# Altium footprint library Footprint-Lib-PhilsLab.PcbLib: 544 footprints (part 1 of 34)
Each footprint in its own frame and in the unit in brackets; x right, y up, seen from the top. Pads: shape width x height; smd on the part's side, far side on the other; paste and mask are expansions set on the pad; w line width, h text height; cw(c..) or ccw(c..) is an arc to the next point about the centre after c.
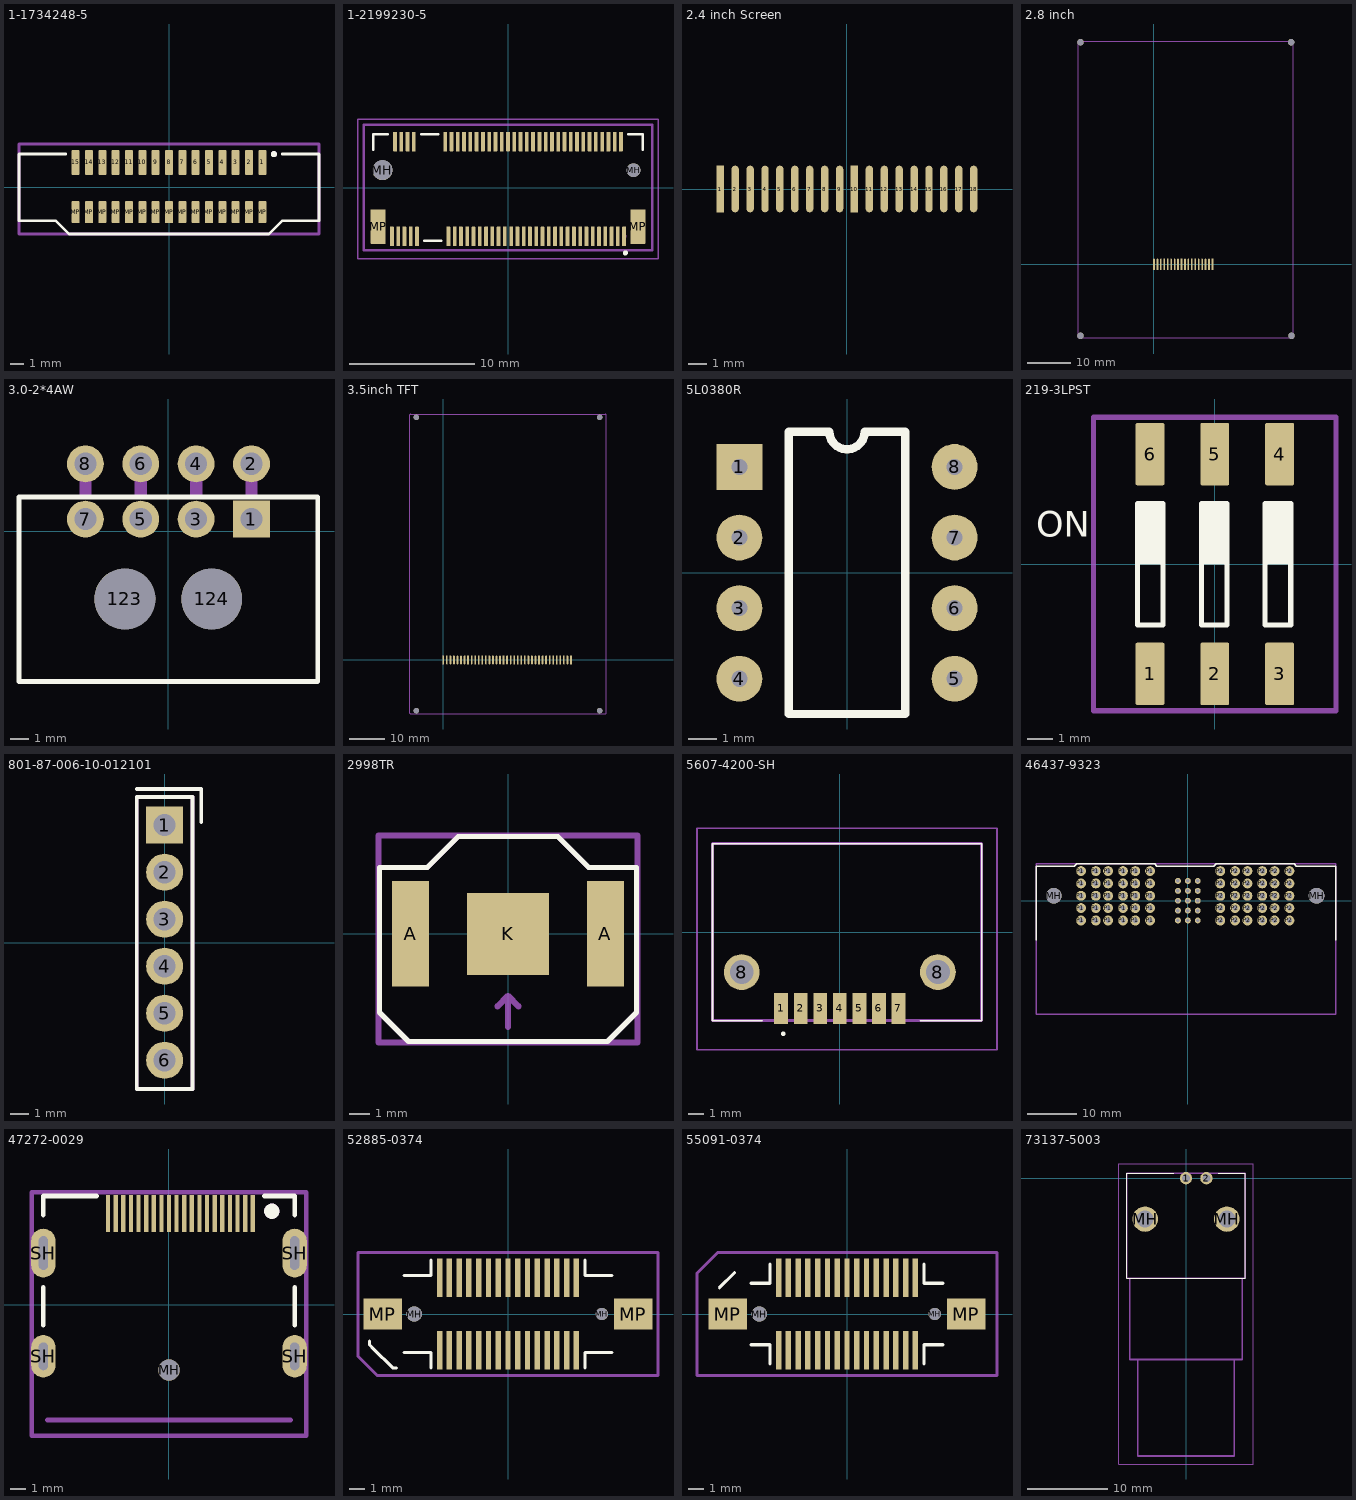
[diagram p0: the footprints below, top view; thin cyan lines are the x and y axes]

## 1-1734248-5 [mm]
pads (30):
  rrect25% 0.6x1.85 smd: 1(7,1.863) 2(6,1.863) 3(5,1.863) 4(4,1.863) 5(3,1.863) 6(2,1.863) 7(1,1.863) 8(0,1.863) 9(-1,1.863) 10(-2,1.863) 11(-3,1.863) 12(-4,1.863) 13(-5,1.863) 14(-6,1.863) 15(-7,1.863)
  rrect25% 0.6x1.65 smd: MP(-7,-1.862) MP(-6,-1.862) MP(-5,-1.862) MP(-4,-1.862) MP(-3,-1.862) MP(-2,-1.862) MP(-1,-1.862) MP(0,-1.862) MP(1,-1.862) MP(2,-1.862) MP(3,-1.862) MP(4,-1.862) MP(5,-1.862) MP(6,-1.862) MP(7,-1.862)
Top Overlay:
  circle w0.25: c7.866,2.49 r0.107
  lines w0.2: -7.75,2.5 -11.25,2.5 -11.25,-2.5 -8.5,-2.5 -7.5,-3.5 7.5,-3.5 8.5,-2.5 11.25,-2.5 11.25,2.5 8.5,2.5
Mechanical 13:
  circle w0.25: c7.871,2.497 r0.102
  lines w0.2: -11.25,-3.5 11.25,-3.5 11.25,3.25 -7.5,3.25 -11.25,3.25 -11.25,-3.5
  text "'.Designator'" at -5.84,-0.925 h1
3D body "1-1734248-5.stp": height 5.69, standoff 0.01, extent -11.2,-2.45 11.2,2.4

## 1-2199230-5 [mm]
pads (71):
  rrect25% 0.3x1.55 smd mask+0.12: 1(9.25,-3.887) 2(9,3.663) 3(8.75,-3.887) 4(8.5,3.663) 5(8.25,-3.887) 6(8,3.663) 7(7.75,-3.887) 8(7.5,3.663) 9(7.25,-3.887) 10(7,3.663) 11(6.75,-3.887) 12(6.5,3.663) 13(6.25,-3.887) 14(6,3.663) 15(5.75,-3.887) 16(5.5,3.663) 17(5.25,-3.887) 18(5,3.663) 19(4.75,-3.887) 20(4.5,3.663) 21(4.25,-3.887) 22(4,3.663) 23(3.75,-3.887) 24(3.5,3.663) 25(3.25,-3.887) 26(3,3.663) 27(2.75,-3.887) 28(2.5,3.663) 29(2.25,-3.887) 30(2,3.663) 31(1.75,-3.887) 32(1.5,3.663) 33(1.25,-3.887) 34(1,3.663) 35(0.75,-3.887) 36(0.5,3.663) 37(0.25,-3.887) 38(0,3.663) 39(-0.25,-3.887) 40(-0.5,3.663) 41(-0.75,-3.887) 42(-1,3.663) 43(-1.25,-3.887) 44(-1.5,3.663) 45(-1.75,-3.887) 46(-2,3.663) 47(-2.25,-3.887) 48(-2.5,3.663) 49(-2.75,-3.887) 50(-3,3.663) 51(-3.25,-3.887) 52(-3.5,3.663) 53(-3.75,-3.887) 54(-4,3.663) 55(-4.25,-3.887) 56(-4.5,3.663) 57(-4.75,-3.887) 58(-5,3.663) 67(-7.25,-3.887) 68(-7.5,3.663) 69(-7.75,-3.887) 70(-8,3.663) 71(-8.25,-3.887) 72(-8.5,3.663) 73(-8.75,-3.887) 74(-9,3.663) 75(-9.25,-3.887)
  round 1.6 hole 1.6 unplated: MH(-10,1.387)
  round 1.1 hole 1.1 unplated: MH(10,1.387)
  rrect10% 1.2x2.75 smd: MP(-10.35,-3.113) MP(10.35,-3.113)
Top Overlay:
  lines w0.2: -10.75,3 -10.75,4.25 -9.6,4.25 ; -6.925,4.25 -5.575,4.25 ; -6.675,-4.25 -5.325,-4.25 ; 9.6,4.25 10.75,4.25 10.75,3 ; 9.25,-5.2 ccw(c9.35,-5.2) 9.45,-5.2 ccw(c9.35,-5.2) 9.25,-5.2
Mechanical 13:
  circle w0.3: c9.25,-3.875 r0.033
  lines w0.2: -11.5,-5 11.5,-5 11.5,5 -11.5,5 -11.5,-5
  text "'.Designator'" at -5.665,-0.417 h1
Mechanical 15:
  lines w0.1: -11.95,-5.662 11.95,-5.662 11.95,5.438 -11.95,5.438 -11.95,-5.662
3D body "1-2199230-5.stp": height 4.08, standoff -0.63, extent -10.95,-4.46 10.95,4.24

## 2.4 inch Screen [mm]
pads (18):
  rect 0.4x2.5 smd: 1(-6.8,0) 10(0.4,0)
  oval 0.4x2.5 smd: 2(-6,0) 3(-5.2,0) 4(-4.4,0) 5(-3.6,0) 6(-2.8,0) 7(-2,0) 8(-1.2,0) 9(-0.4,0) 11(1.2,0) 12(2,0) 13(2.8,0) 14(3.6,0) 15(4.4,0) 16(5.2,0) 17(6,0) 18(6.8,0)
3D body "SOC 2.4 - A.STEP": height 3.75, standoff 0, extent -20.72,-17.16 22,43.1

## 2.8 inch [mm]
pads (22):
  oval 0.4x2.7 smd: 1(0,0) 2(0.8,0) 3(1.6,0) 4(2.4,0) 5(3.2,0) 6(4,0) 7(4.8,0) 8(5.6,0) 10(7.2,0) 11(8,0) 12(8.8,0) 13(9.6,0) 14(10.4,0) 15(11.2,0) 16(12,0) 17(12.8,0)
  rect 0.4x2.7 smd: 9(6.4,0) 18(13.6,0)
  round 1.5 hole 1.5: 115(-17.1,51.7) 116(31.9,51.7) 117(32,-16.6) 118(-17.1,-16.6)
Mechanical 1:
  lines w0.254: -17.58,-17.05 32.42,-17.05 32.42,51.95 -17.58,51.95 -17.58,-17.05
3D body "SOC2.8-D.STEP": height 3.55, standoff -0.8, extent -17.58,-17.05 32.42,52.15

## 3.0-2*4AW [mm] "2x4P 8P Micro-Fit(MX 3.0) 3mm 4 2 3mm Bend-in Push-Pull,P=3mm Wire To Board Connector ROHS"
pads (10):
  rect 2x2 hole 1.2 paste-2539.97 mask+0.05: 1(4.5,0.662)
  round 2 hole 1.2 paste-2539.97 mask+0.05: 2(4.5,3.662) 3(1.5,0.662) 4(1.5,3.662) 5(-1.5,0.662) 6(-1.5,3.662) 7(-4.5,0.662) 8(-4.5,3.662)
  round 3.3 hole 3.3: 123(-2.364,-3.662) 124(2.35,-3.662)
Top Overlay:
  lines w0.254: -8.1,-8.138 -8.1,1.862 8.1,1.862 8.1,-8.138 -8.1,-8.138
Mechanical 15:
  region: 4.18,0.982 4.82,0.982 4.82,0.342 4.18,0.342
  region: 4.18,3.982 4.82,3.982 4.82,3.342 4.18,3.342
  region: 1.18,0.982 1.82,0.982 1.82,0.342 1.18,0.342
  region: 1.18,3.982 1.82,3.982 1.82,3.342 1.18,3.342
  region: -1.82,0.982 -1.18,0.982 -1.18,0.342 -1.82,0.342
  region: -1.82,3.982 -1.18,3.982 -1.18,3.342 -1.82,3.342
  region: -4.82,0.982 -4.18,0.982 -4.18,0.342 -4.82,0.342
  region: -4.82,3.982 -4.18,3.982 -4.18,3.342 -4.82,3.342
  region: 4.82,3.982 4.18,3.982 4.18,1.832 4.82,1.832
  region: 1.82,3.982 1.18,3.982 1.18,1.832 1.82,1.832
  region: -1.18,3.982 -1.82,3.982 -1.82,1.832 -1.18,1.832
  region: -4.18,3.982 -4.82,3.982 -4.82,1.832 -4.18,1.832
  region: 8.04,-8.138 8.04,-8.163 8.075,-8.198 8.125,-8.198 8.16,-8.163 8.16,-8.138 8.16,-8.113 8.125,-8.078 8.075,-8.078 8.04,-8.113
  lines w0.051: -8.1,-8.138 8.1,-8.138 8.1,1.862 -8.1,1.862 -8.1,-8.138

## 3.5inch TFT [mm]
pads (41):
  oval 0.5x2.5 smd: 1(0,0) 2(1,0) 3(2,0) 4(3,0) 5(4,0) 6(5,0) 7(6,0) 9(8,0) 10(9,0) 11(10,0) 12(11,0) 13(12,0) 14(13,0) 15(14,0) 16(15,0) 17(16,0) 19(18,0) 20(19,0) 21(20,0) 22(21,0) 23(22,0) 24(23,0) 25(24,0) 26(25,0) 27(26,0) 29(28,0) 30(29,0) 31(30,0) 32(31,0) 33(32,0) 34(33,0) 35(34,0) 36(35,0)
  rect 0.5x2.5 smd: 8(7,0) 18(17,0) 28(27,0) 37(36,0)
  round 1.5 hole 1.5 unplated mask+0: 71(44.1,-14.3) 72(-7.6,-14.3) 73(44.1,68.4) 74(-7.6,68.4)
Mechanical 1:
  lines w0.254: -9.4,-14.992 ccw(c-9.146,-14.992) -9.146,-15.246 45.646,-15.246 ccw(c45.646,-14.992) 45.9,-14.992 45.9,69.1 ccw(c45.646,69.1) 45.646,69.354 -9.146,69.354 ccw(c-9.146,69.1) -9.4,69.1 -9.4,-14.992
3D body "(updated)ER-TFT035-6_3D.STEP": height 3.05, standoff -0.8, extent -10.115,-15.155 46.425,69.805

## 5L0380R [mm]
pads (8):
  rect 1.624x1.624 hole 0.57: 1(-3.81,3.75)
  round 1.624 hole 0.57: 2(-3.81,1.25) 3(-3.81,-1.25) 4(-3.81,-3.75) 5(3.81,-3.75) 6(3.81,-1.25) 7(3.81,1.25) 8(3.81,3.75)
Top Overlay:
  lines w0.3: -2.063,-5 2.063,-5 2.063,5 0.625,5 cw(c0,5) -0.625,5 -2.063,5 -2.063,-5

## 219-3LPST [mm]
pads (6):
  rrect10% 1.13x2.44 smd mask+0: 1(-2.54,-4.305) 2(0,-4.305) 3(2.54,-4.305) 4(2.54,4.305) 5(0,4.305) 6(-2.54,4.305)
Top Overlay:
  region: 1.975,2.365 2.975,2.365 2.975,-0.01 1.975,-0.01
  region: -0.525,2.365 0.475,2.365 0.475,-0.01 -0.525,-0.01
  region: -3.025,2.365 -2.025,2.365 -2.025,-0.01 -3.025,-0.01
  lines w0.2: -3.025,-2.385 -2.025,-2.385 -2.025,2.365 -3.025,2.365 -3.025,-2.385 ; -0.525,-2.385 0.475,-2.385 0.475,2.365 -0.525,2.365 -0.525,-2.385 ; 1.975,-2.385 2.975,-2.385 2.975,2.365 1.975,2.365 1.975,-2.385
  text "ON" at -7.008,1.075 h1
Mechanical 13:
  lines w0.2: -4.75,-5.75 4.75,-5.75 4.75,-5.25 4.75,5.75 -4.75,5.75 -4.75,-5.75
  text "'.Designator'" at -5.84,-0.925 h1
3D body "219-3poles.stp": height 4.31, standoff 0.01, extent -4.545,-4.955 4.545,4.955

## 801-87-006-10-012101 [mm]
pads (6):
  rect 2x2 hole 1.2 mask+0.07: 1(0,6.35)
  round 2 hole 1.2 mask+0.07: 2(0,3.81) 3(0,1.27) 4(0,-1.27) 5(0,-3.81) 6(0,-6.35)
Top Overlay:
  lines w0.2: -1.5,8.3 1.972,8.3 1.972,6.5 ; -1.5,-7.9 -1.5,7.863 1.5,7.863 1.5,-7.9 -1.5,-7.9
Mechanical 13:
  circle w0.25: c-0.012,6.336 r0.823
  lines w0.2: -1.5,-7.9 -1.5,7.864 1.5,7.864 1.5,-7.9 -1.5,-7.9
  text "'.Designator'" at -5.84,-0.925 h1
3D body "801-87-006-10-012101.stp": height 4.21, standoff -3.17, extent -1.27,-7.62 1.27,7.62

## 2998TR [mm] "6.8mm Coin Cell Holder SMD"
height 3.05
pads (3):
  rect 1.78x5.08 smd: A(-4.7,0) A(4.7,0)
  rect 3.96x3.96 smd: K(0,0)
Top Overlay:
  lines w0.25: -6.2,-3.8 -4.8,-5.2 4.8,-5.2 6.2,-3.8 6.2,3.2 3.9,3.2 2.4,4.7 -2.4,4.7 -3.9,3.2 -6.2,3.2 -6.2,-3.8
Mechanical 13:
  lines w0.25: -5.25,-1.25 -4.25,-1.25 ; -4.75,-1.75 -4.75,-0.75 ; -0.5,-1.25 0.5,-1.25 ; 4.25,-1.25 5.25,-1.25 ; 4.75,-1.75 4.75,-0.75 ; -6.2,-3.8 -4.8,-5.2 4.8,-5.2 6.2,-3.8 6.2,3.2 3.9,3.2 2.4,4.7 -2.4,4.7 -3.9,3.2 -6.2,3.2 -6.2,-3.8
  lines w0.3: 0,-4.5 0,-3 ; 0.5,-3.5 0,-3 ; -0.5,-3.5 -0.5,-3.5 ; -0.5,-3.5 0,-3 ; 0,-3 0,-3 ; -6.25,-5.25 -6.25,4.75 6.25,4.75 6.25,-5.25 -6.25,-5.25
  text "'.Designator'" at -5.665,-0.417 h1
3D body "2998TR.STEP": height 3.06, standoff 0.01, extent -5.357,-3.968 5.357,4.033

## 5607-4200-SH [mm]
pads (9):
  rect 0.9x2 smd: 1(-3.81,-4.96) 2(-2.54,-4.96) 3(-1.27,-4.96) 4(0,-4.96) 5(1.27,-4.96) 6(2.54,-4.96) 7(3.81,-4.96)
  round 2.325 hole 1.55: 8(-6.37,-2.6) 8(6.37,-2.6)
Top Overlay:
  lines w0.1: -8.275,5.75 -8.275,-5.75 -8.26,-5.75 ; -8.275,5.75 -8.26,5.75 -8.26,-5.75 ; -8.275,5.75 9.21,5.75 ; -8.275,5.75 9.21,5.75 ; -8.26,-5.75 -5.025,-5.75 -8.26,-5.75 ; 9.21,-5.75 9.21,5.75 ; 9.21,-5.75 9.21,5.75 ; 9.21,-5.75 5.225,-5.75 9.21,-5.75
  lines w0.2: -3.725,-6.6 cw(c-3.675,-6.6) -3.625,-6.6 ; -3.725,-6.6 ccw(c-3.675,-6.6) -3.625,-6.6 ; -3.725,-6.6 cw(c-3.675,-6.6) -3.625,-6.6
Mechanical 13:
  lines w0.2: -8.26,-5.75 -8.26,5.75 9.21,5.75 9.21,-5.75 -8.26,-5.75
  text "'.Designator'" at -5.84,-0.925 h1
Mechanical 15:
  lines w0.1: -9.275,-7.65 10.21,-7.65 10.21,6.75 -9.275,6.75 -9.275,-7.65
3D body "5607-4200-SH.stp": height 4.1, standoff -5, extent -8.26,-5.87 9.21,5.75

## 46437-9323 [mm]
pads (77):
  round 1.2 hole 0.7: A1(-2,-4) A2(0,-4) A3(2,-4) B1(-2,-2) B2(0,-2) B3(2,-2) C1(-2,0) C2(0,0) C3(2,0) D1(-2,2) D2(0,2) D3(2,2) E1(-2,4) E2(0,4) E3(2,4)
  round 3.2 hole 3.2 unplated: MH(-27.14,1) MH(26.07,1)
  round 2 hole 1.05: P1(-21.64,-4) P1(-21.64,-1.5) P1(-21.64,1) P1(-21.64,3.5) P1(-21.64,6) P1(-18.64,-4) P1(-18.64,-1.5) P1(-18.64,1) P1(-18.64,3.5) P1(-18.64,6) P1(-16.14,-4) P1(-16.14,-1.5) P1(-16.14,1) P1(-16.14,3.5) P1(-16.14,6) P1(-13.14,-4) P1(-13.14,-1.5) P1(-13.14,1) P1(-13.14,3.5) P1(-13.14,6) P1(-10.64,-4) P1(-10.64,-1.5) P1(-10.64,1) P1(-10.64,3.5) P1(-10.64,6) P1(-7.64,-4) P1(-7.64,-1.5) P1(-7.64,1) P1(-7.64,3.5) P1(-7.64,6) P2(6.57,-4) P2(6.57,-1.5) P2(6.57,1) P2(6.57,3.5) P2(6.57,6) P2(9.57,-4) P2(9.57,-1.5) P2(9.57,1) P2(9.57,3.5) P2(9.57,6) P2(12.07,-4) P2(12.07,-1.5) P2(12.07,1) P2(12.07,3.5) P2(12.07,6) P2(15.07,-4) P2(15.07,-1.5) P2(15.07,1) P2(15.07,3.5) P2(15.07,6) P2(17.57,-4) P2(17.57,-1.5) P2(17.57,1) P2(17.57,3.5) P2(17.57,6) P2(20.57,-4) P2(20.57,-1.5) P2(20.57,1) P2(20.57,3.5) P2(20.57,6)
Top Overlay:
  lines w0.3: -30.75,-8 -30.75,7 -23,7 -22.5,7.5 -20.5,7.5 -6.75,7.5 -6.25,7 5.25,7 5.75,7.5 21.5,7.5 22,7 30,7 30,-8
Mechanical 13:
  lines w0.3: -30.75,-23 30,-23 30,7.5 0.5,7.5 -30.75,7.5 -30.75,-23
  text "'.Designator'" at -5.815,-0.9 h1
3D body "46437-9323.stp": height 11.51, standoff -3.45, extent -30.5,-22.646 29.808,6.628

## 47272-0029 [mm]
pads (25):
  rect 0.28x2.4 smd mask+0.15: 1(5.5,5.99) 2(5,5.99) 3(4.5,5.99) 4(4,5.99) 5(3.5,5.99) 6(3,5.99) 7(2.5,5.99) 8(2,5.99) 9(1.5,5.99) 10(1,5.99) 11(0.5,5.99) 12(0,5.99) 13(-0.5,5.99) 14(-1,5.99) 15(-1.5,5.99) 16(-2,5.99) 17(-2.5,5.99) 18(-3,5.99) 19(-3.5,5.99) 20(-4,5.99)
  round 1.4 hole 1.4 unplated: MH(0,-4.29)
  oval 1.6x2.8 hole 0.6 slot 1.8 at 90 deg: SH(-8.25,-3.39) SH(8.25,-3.39)
  oval 1.6x3.2 hole 0.6 slot 2.2 at 90 deg: SH(-8.25,3.39) SH(8.25,3.39)
Top Overlay:
  circle w0.5: c6.75,6.14 r0.25
  lines w0.3: -8.25,-1.36 -8.25,1.14 ; -8.25,5.89 -8.25,7.14 -4.75,7.14 ; 6.25,7.14 8.25,7.14 8.25,5.89 ; 8.25,-1.36 8.25,1.14
Mechanical 13:
  circle w0.5: c6.75,6.14 r0.25
  lines w0.3: -8,-7.57 8,-7.57 ; -9,-8.61 -9,7.39 9,7.39 9,-8.61 -9,-8.61
  text "PCB EDGE" at -2.032,-7.21 h0.5
  text "'.Designator'" at -5.815,2.49 h1
3D body "472720029.stp": height 6.73, standoff -1.92, extent -8.895,-8.59 8.89,6.3

## 52885-0374 [mm]
pads (34):
  rect 0.35x2.5 smd mask+0.05: 1(-4.445,-2.35) 2(-3.81,-2.35) 3(-3.175,-2.35) 4(-2.54,-2.35) 5(-1.905,-2.35) 6(-1.27,-2.35) 7(-0.635,-2.35) 8(0,-2.35) 9(0.635,-2.35) 10(1.27,-2.35) 11(1.905,-2.35) 12(2.54,-2.35) 13(3.175,-2.35) 14(3.81,-2.35) 15(4.445,-2.35) 16(4.445,2.35) 17(3.81,2.35) 18(3.175,2.35) 19(2.54,2.35) 20(1.905,2.35) 21(1.27,2.35) 22(0.635,2.35) 23(0,2.35) 24(-0.635,2.35) 25(-1.27,2.35) 26(-1.905,2.35) 27(-2.54,2.35) 28(-3.175,2.35) 29(-3.81,2.35) 30(-4.445,2.35)
  round 1 hole 1 unplated: MH(-6.1,0)
  round 0.8 hole 0.8 unplated: MH(6.1,0)
  rect 2.5x2 smd mask+0.05: MP(-8.15,0) MP(8.15,0)
Top Overlay:
  lines w0.2: -9,-1.75 -9,-2 -8.75,-2.25 -7.5,-3.5 -7.25,-3.5 ; -6.75,-2.5 -5,-2.5 -5,-3.5 ; -6.75,2.5 -5,2.5 -5,3.5 ; 5,-3.5 5,-2.5 6.75,-2.5 ; 5,3.5 5,2.5 6.75,2.5
Mechanical 13:
  lines w0.2: -9.75,-2.75 -8.5,-4 9.75,-4 9.75,4 9.5,4 -9.75,4 -9.75,0 -9.75,-2.75
  text "'.Designator'" at -7.231,-1.087 h1.25
3D body "528850374.stp": height 4.21, standoff -0.59, extent -8.7,-3.2 8.7,3.2

## 55091-0374 [mm]
pads (34):
  rect 0.35x2.5 smd mask+0.05: 1(-4.445,2.35) 2(-3.81,2.35) 3(-3.175,2.35) 4(-2.54,2.35) 5(-1.905,2.35) 6(-1.27,2.35) 7(-0.635,2.35) 8(0,2.35) 9(0.635,2.35) 10(1.27,2.35) 11(1.905,2.35) 12(2.54,2.35) 13(3.175,2.35) 14(3.81,2.35) 15(4.445,2.35) 16(4.445,-2.35) 17(3.81,-2.35) 18(3.175,-2.35) 19(2.54,-2.35) 20(1.905,-2.35) 21(1.27,-2.35) 22(0.635,-2.35) 23(0,-2.35) 24(-0.635,-2.35) 25(-1.27,-2.35) 26(-1.905,-2.35) 27(-2.54,-2.35) 28(-3.175,-2.35) 29(-3.81,-2.35) 30(-4.445,-2.35)
  round 1 hole 1 unplated: MH(-5.7,0)
  round 0.8 hole 0.8 unplated: MH(5.7,0)
  rect 2.5x2 smd mask+0.05: MP(-7.75,0) MP(7.75,0)
Top Overlay:
  lines w0.2: -8.3,1.7 -7.3,2.7 ; -6.25,-2 -5,-2 -5,-3.25 ; -6.25,2 -5,2 -5,3.25 ; 5,-3.25 5,-2 6.25,-2 ; 5,3.25 5,2 6.25,2
Mechanical 13:
  lines w0.2: -9.75,-4 -9.75,0 -9.75,2.65 -8.4,4 9.5,4 9.75,4 9.75,-4 -9.75,-4
  text "'.Designator'" at -7.231,-1.087 h1.25
3D body "550910374.stp": height 5.21, standoff -0.59, extent -8.2,-2.6 8.2,2.6

## 73137-5003 [mm]
pads (4):
  round 1.54 hole 0.99: 1(0,0) 2(2.54,0)
  round 3.165 hole 2.11: MH(-5.08,-5.08) MH(5.08,-5.08)
Top Overlay:
  lines w0.1: -1.5,0.64 -7.38,0.64 -7.38,-12.44 7.38,-12.44 7.38,0.64 4,0.64
Mechanical 13:
  lines w0.2: -7.38,-12.44 7.38,-12.44 7.38,0.64 -7.38,0.64 -7.38,-12.44 ; -7,-22.54 7,-22.54 7,-12.44 -7,-12.44 -7,-22.54 ; -6,-34.54 6,-34.54 6,-22.54 -6,-22.54 -6,-34.54
  text "'.Designator'" at -6.315,-6.4 h1
Mechanical 15:
  lines w0.1: -8.38,-35.54 8.38,-35.54 8.38,1.77 -8.38,1.77 -8.38,-35.54
3D body "73137-5003.stp": height 12.51, standoff -4.84, extent -7.38,-33.18 7.38,2